# Altium footprint library Eduard.PcbLib: 54 footprints (part 1 of 4)
Each footprint in its own frame and in the unit in brackets; x right, y up, seen from the top. Pads: shape width x height; smd on the part's side, far side on the other; paste and mask are expansions set on the pad; w line width, h text height; cw(c..) or ccw(c..) is an arc to the next point about the centre after c.
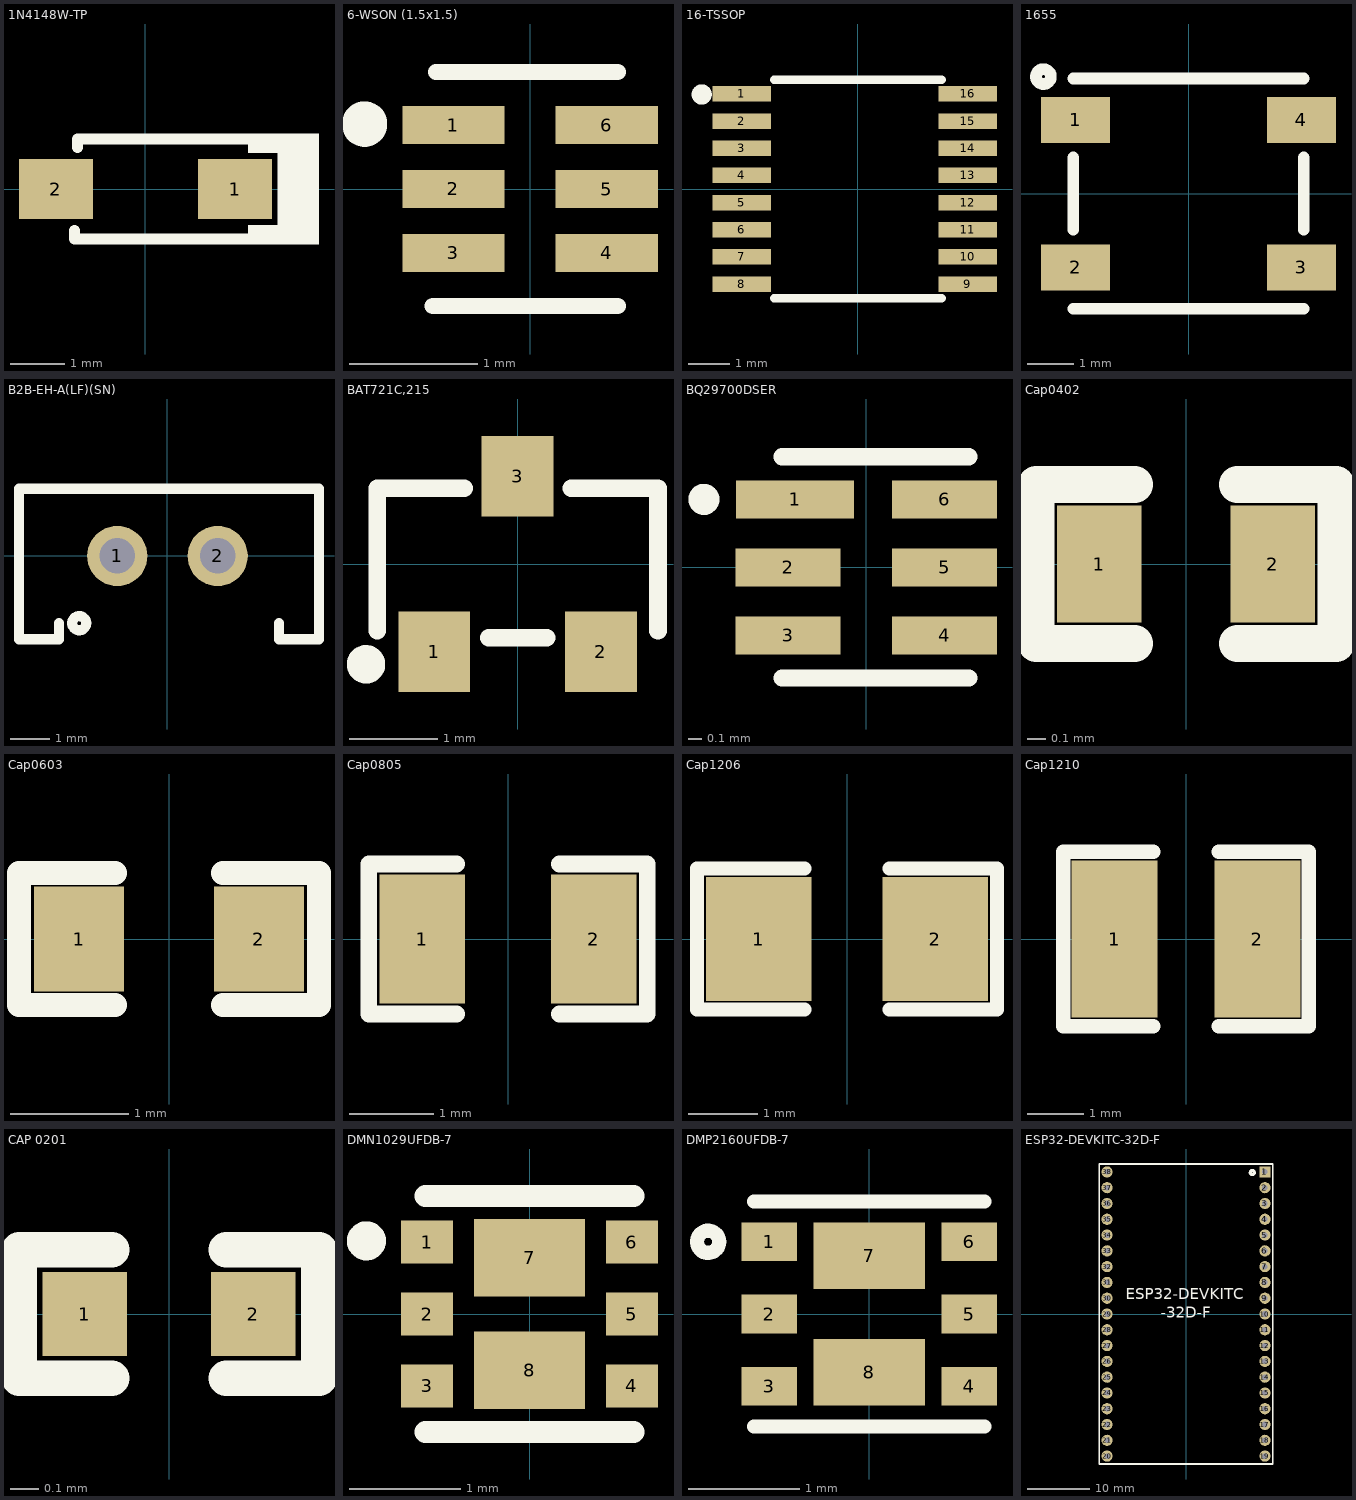
[diagram p0: the footprints below, top view; thin cyan lines are the x and y axes]

## 1N4148W-TP [mm] "DIODE GEN PURP 100V 150MA SOD123"
pads (2):
  rect 1.35x1.1 smd: 1(1.638,0) 2(-1.638,0)
Top Overlay:
  rectangle: 2.413,-1.016 3.175,1.016
  rectangle: 1.88,-1.016 2.489,-0.66
  rectangle: 1.88,0.66 2.464,1.016
  lines w0.2: -1.295,-0.762 -1.295,-0.914 1.88,-0.914 ; -1.245,0.762 -1.245,0.914 1.88,0.914
3D body "CircuitWorks-SOD123.step": height 1.27, standoff 0, extent -1.824,-0.8 1.876,0.8

## 6-WSON (1.5x1.5) [mm]
pads (6):
  rect 0.8x0.3 smd: 1(-0.6,0.5) 2(-0.6,0) 3(-0.6,-0.5) 4(0.6,-0.5) 5(0.6,0) 6(0.6,0.5)
Top Overlay:
  circle w0.254: c-1.295,0.508 r0.051
  lines w0.127: -0.762,-0.914 0.686,-0.914 ; -0.737,0.914 0.686,0.914
3D body "3dmodel.step": height 0.25, standoff 0, extent -1.05,-0.875 1.05,0.875

## 16-TSSOP [mm]
pads (16):
  rect 1.4x0.37 smd: 1(-2.775,2.275) 2(-2.775,1.625) 3(-2.775,0.975) 4(-2.775,0.325) 5(-2.775,-0.325) 6(-2.775,-0.975) 7(-2.775,-1.625) 8(-2.775,-2.275) 9(2.625,-2.275) 10(2.625,-1.625) 11(2.625,-0.975) 12(2.625,-0.325) 13(2.625,0.325) 14(2.625,0.975) 15(2.625,1.625) 16(2.625,2.275)
Top Overlay:
  circle w0.254: c-3.734,2.261 r0.114
  lines w0.2: -2.007,-2.616 2.007,-2.616 ; -2.007,2.616 2.007,2.616
3D body "User Library-TSSOP-16-for-ON-SEMI-MC74HC595ADTR2G-Text.step": height 1.2, standoff -0.02, extent -3.2,-2.55 3.2,2.55

## 1655 [mm]
pads (4):
  rect 1.5x1 smd: 1(-2.45,1.6) 2(-2.45,-1.6) 3(2.45,-1.6) 4(2.45,1.6)
Top Overlay:
  circle w0.254: c-3.15,2.54 r0.162
  lines w0.254: -2.5,-2.5 2.5,-2.5 ; -2.5,-0.786 -2.5,0.787 ; -2.5,2.5 2.5,2.5 ; 2.5,-0.786 2.5,0.787
3D body "1655--3DModel-STEP-56544.STEP": height 1.58, standoff -0.02, extent -2.7,-2.5 2.7,2.5

## B2B-EH-A(LF)(SN) [mil]
pads (2):
  round 60 hole 35.43: 1(-50,0) 2(50,0)
Top Overlay:
  circle w10: c-88,-67 r7.07
  lines w10: -108,-67 -108,-83 -148,-83 -148,67 151,67 151,-83 111,-83 111,-67
3D body "User Library-B2B-EH-A.step": height 244.09, standoff -118.11, extent -147.64,-85.61 147.64,64

## BAT721C,215 [mm]
pads (3):
  rect 0.82x0.92 smd: 1(-0.95,-1) 2(0.95,-1) 3(0,1)
Top Overlay:
  circle w0.254: c-1.727,-1.143 r0.092
  lines w0.2: -1.6,-0.762 -1.6,0.864 -0.61,0.864 ; -0.33,-0.838 0.33,-0.838 ; 0.61,0.864 1.6,0.864 1.6,-0.762
3D body "CircuitWorks-SOT-23.step": height 1.1, standoff 0, extent -1.5,-1.25 1.5,1.25

## BQ29700DSER [mm] "IC LITHIUM BATT PROTECT 6-SON"
pads (6):
  rect 0.87x0.28 smd: 1(-0.524,0.5)
  rect 0.77x0.28 smd: 2(-0.575,0) 3(-0.575,-0.5) 4(0.575,-0.5) 5(0.575,0) 6(0.575,0.5)
Top Overlay:
  circle w0.127: c-1.194,0.5 r0.051
  lines w0.127: -0.62,-0.813 0.752,-0.813 ; -0.62,0.813 0.752,0.813
3D body "User Library-DSE(S-PDSO-N6).step": height 0.75, standoff 0, extent -0.77,-0.75 0.77,0.75

## Cap0402 [mil]
pads (2):
  rect 18x25 smd mask+2.36: 1(-18.5,0) 2(18.5,0)
Top Overlay:
  lines w7.87: -11,-17 -32,-17 -32,17 -11,17 ; 11,-17 32,-17 32,17 11,17
3D body "User Library-Capacitor 0402.step": height 18.5, standoff -1.18, extent -19.68,-9.84 19.7,9.85

## Cap0603 [mil]
pads (2):
  rect 30x35 smd mask+2.36: 1(-30,0) 2(30,0)
Top Overlay:
  lines w7.87: -18,-22 -50,-22 -50,22 -18,22 ; 18,-22 50,-22 50,22 18,22
3D body "User Library-CAPC1608X09.step": height 34.25, standoff -1.18, extent -31.51,-15.75 31.49,15.74

## Cap0805 [mil] "SMD 0805"
pads (2):
  rect 40x60 smd mask+2.76: 1(-40,0) 2(40,0)
Top Overlay:
  lines w7.87: -24,-35 -65,-35 -65,35 -24,35 ; 24,-35 65,-35 65,35 24,35
3D body "User Library-0805 SMD Capacitor.step": height 30, standoff -0.79, extent -39.36,-24.6 39.38,24.61

## Cap1206 [mil] "SMD 1206"
pads (2):
  rect 60x70 smd: 1(-50,0) 2(50,0)
Top Overlay:
  lines w7.87: -24,-40 -85,-40 -85,40 -24,40 ; 24,-40 85,-40 85,40 24,40
3D body "User Library-1206 SMD Capacitor.step": height 39.45, standoff 0, extent -62.96,-31.46 63.03,31.53

## Cap1210 [mil] "SMD 1210"
pads (2):
  rect 60x110 smd: 1(-50,0) 2(50,0)
Top Overlay:
  lines w10: -23,-61 -86,-61 -86,61 -23,61 ; 23,-61 86,-61 86,61 23,61
3D body "User Library-CAPC3225X10.step": height 39.37, standoff 0, extent -62.99,-49.21 63,49.22

## CAP 0201 [mm]
pads (2):
  rect 0.3x0.3 smd: 1(-0.3,0) 2(0.3,0)
Top Overlay:
  lines w0.127: -0.203,-0.229 -0.533,-0.229 -0.533,0.229 -0.203,0.229 ; 0.203,-0.229 0.533,-0.229 0.533,0.229 0.203,0.229
3D body "User Library-SMD Ceramic Capacitors_0201 (0603)_AB.STEP": height 0.28, standoff -0.02, extent -0.3,-0.15 0.301,0.15

## DMN1029UFDB-7 [mm]
pads (8):
  rect 0.47x0.39 smd: 1(-0.925,0.65) 2(-0.925,0) 3(-0.925,-0.65) 4(0.925,-0.65) 5(0.925,0) 6(0.925,0.65)
  rect 1x0.7 smd: 7(0,0.508) 8(0,-0.508)
Top Overlay:
  circle w0.2: c-1.473,0.66 r0.076
  lines w0.2: -0.94,-1.067 0.94,-1.067 ; -0.94,1.067 0.94,1.067
3D body "User Library-SOT1118 DFN2020-6.step": height 0.65, standoff 0, extent -1.04,-1.004 1.04,1.004

## DMP2160UFDB-7 [mm]
pads (8):
  rect 0.5x0.35 smd: 1(-0.9,0.65) 2(-0.9,0) 3(-0.9,-0.65) 4(0.9,-0.65) 5(0.9,0) 6(0.9,0.65)
  rect 1x0.6 smd: 7(0,0.525) 8(0,-0.525)
Top Overlay:
  circle w0.127: c-1.45,0.65 r0.1
  lines w0.127: -1.038,-1.012 1.038,-1.012 ; -1.038,1.012 1.038,1.012

## ESP32-DEVKITC-32D-F [mm]
pads (38):
  rect 1.8x1.8 hole 0.9: 1(12.7,22.86)
  round 1.8 hole 0.9: 2(12.7,20.32) 3(12.7,17.78) 4(12.7,15.24) 5(12.7,12.7) 6(12.7,10.16) 7(12.7,7.62) 8(12.7,5.08) 9(12.7,2.54) 10(12.7,0) 11(12.7,-2.54) 12(12.7,-5.08) 13(12.7,-7.62) 14(12.7,-10.16) 15(12.7,-12.7) 16(12.7,-15.24) 17(12.7,-17.78) 18(12.7,-20.32) 19(12.7,-22.86) 20(-12.7,-22.86) 21(-12.7,-20.32) 22(-12.7,-17.78) 23(-12.7,-15.24) 24(-12.7,-12.7) 25(-12.7,-10.16) 26(-12.7,-7.62) 27(-12.7,-5.08) 28(-12.7,-2.54) 29(-12.7,0) 30(-12.7,2.54) 31(-12.7,5.08) 32(-12.7,7.62) 33(-12.7,10.16) 34(-12.7,12.7) 35(-12.7,15.24) 36(-12.7,17.78) 37(-12.7,20.32) 38(-12.7,22.86)
Top Overlay:
  circle w0.5: c10.668,22.758 r0.33
  lines w0.254: -13.97,-24.13 13.97,-24.13 13.97,24.13 -13.97,24.13 -13.97,-24.13
  text "ESP32-DEVKITC /        -32D-F" at -9.703,-1.27 h3
3D body "ESP32S Dev Board 0.9inch width ASSY.STEP": height 4.6, standoff -8.54, extent -13.818,-25.362 12.09,23.952
3D body "HMTSW-119-09-T-S-085.stp": height 17.04, standoff -1.5, extent 11.455,-24.13 13.944,24.13
3D body "HMTSW-119-09-T-S-085.stp": height 17.04, standoff -1.5, extent -13.945,-24.13 -11.456,24.13